# Altium footprint library Footprints.PcbLib: 320 footprints (part 4 of 20)
Each footprint in its own frame and in the unit in brackets; x right, y up, seen from the top. Pads: shape width x height; smd on the part's side, far side on the other; paste and mask are expansions set on the pad; w line width, h text height; cw(c..) or ccw(c..) is an arc to the next point about the centre after c.
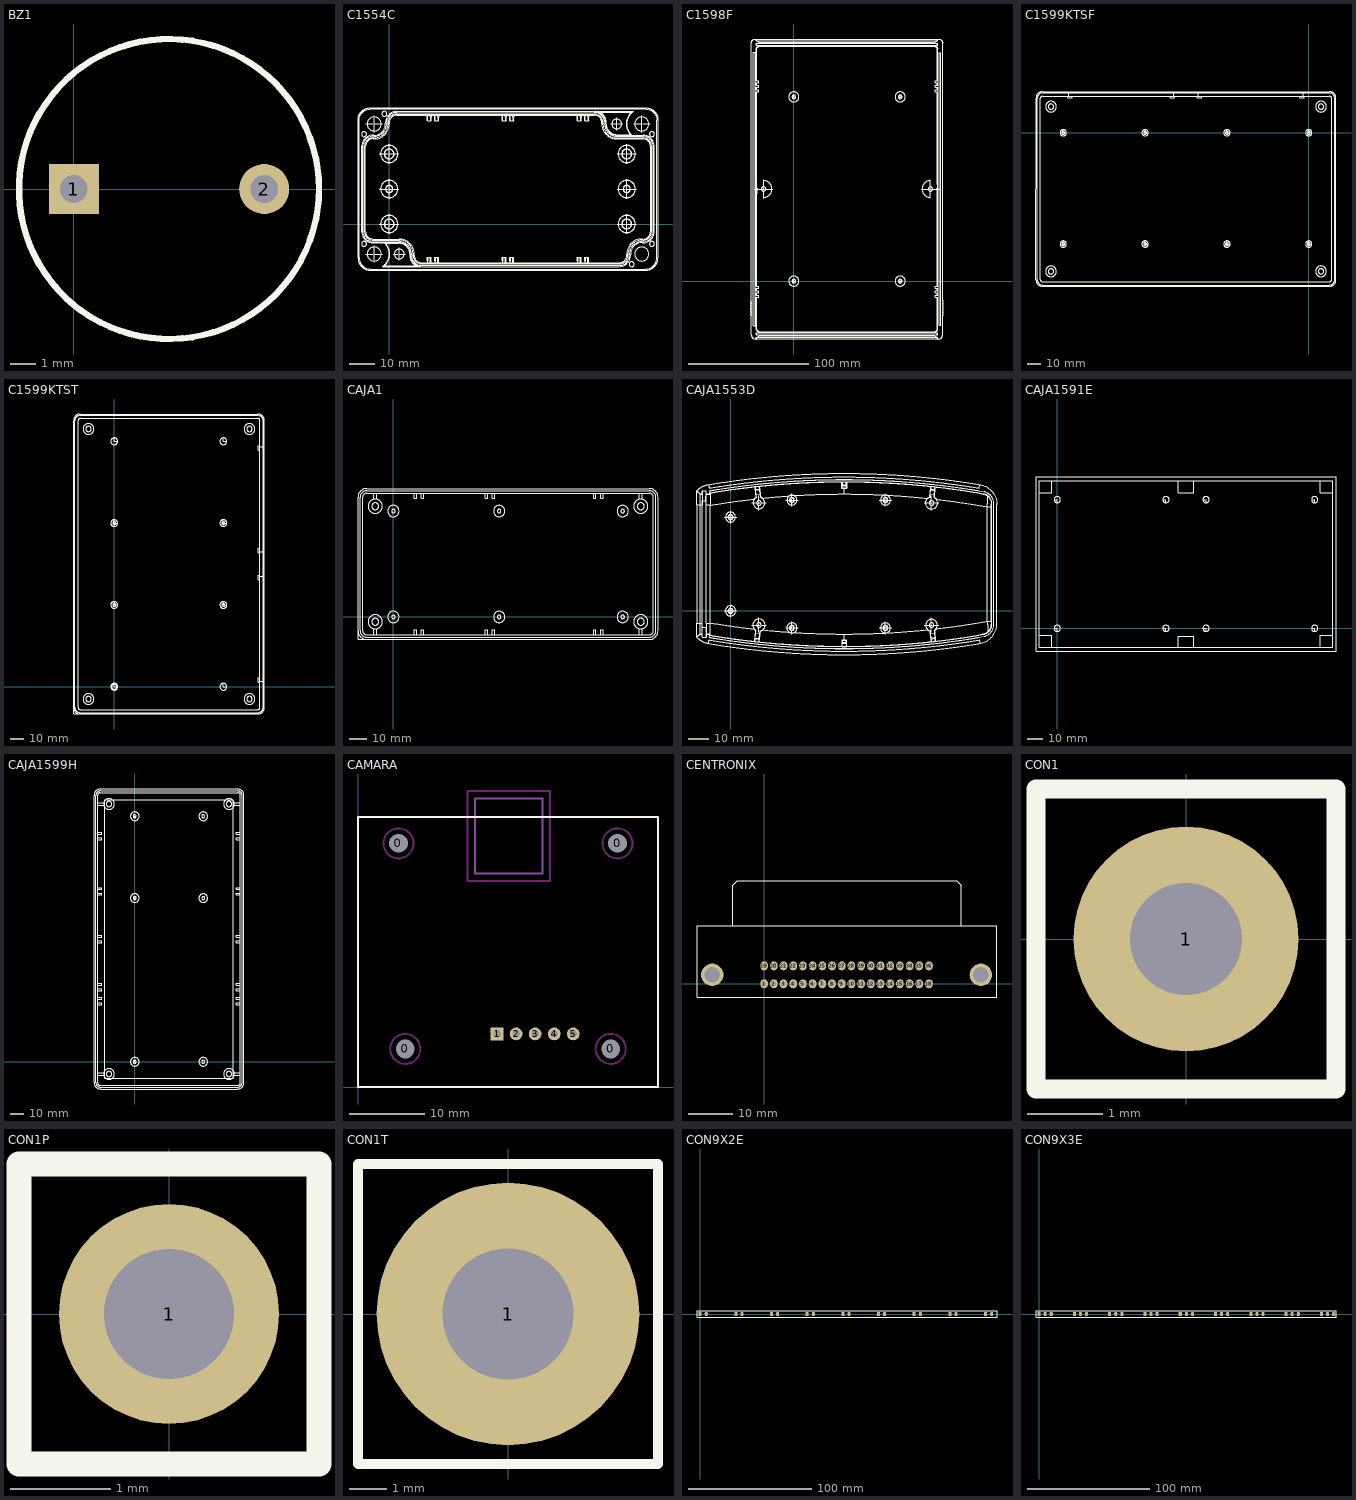
[diagram p3: the footprints below, top view; thin cyan lines are the x and y axes]

## BZ1 [mm]
pads (2):
  rect 2x2 hole 1.1: 1(0,0)
  round 2 hole 1.1: 2(7.62,0)
Top Overlay:
  circle w0.254: c3.81,0 r6

## C1554C [mm]
Top Overlay:
  drawing of 6162 lines, arcs and shapes, not listed

## C1598F [mm]
Top Overlay:
  drawing of 3070 lines, arcs and shapes, not listed

## C1599KTSF [mm]
Top Overlay:
  circle w0.2: c-189,19.16 r1.968
  circle w0.2: c-189,19.16 r3.962
  circle w0.2: c9,19.16 r3.962
  circle w0.2: c9,19.16 r1.968
  circle w0.2: c9,-101.632 r3.962
  circle w0.2: c9,-101.632 r1.968
  circle w0.2: c-189,-101.632 r3.962
  circle w0.2: c-189,-101.632 r1.968
  circle w0.2: c-180,0 r1.079
  circle w0.2: c-180,0 r2.362
  circle w0.2: c-120,0 r2.362
  circle w0.2: c-120,0 r1.079
  circle w0.2: c-60,0 r2.362
  circle w0.2: c-60,0 r1.079
  circle w0.2: c0,0 r2.362
  circle w0.2: c0,0 r1.079
  circle w0.2: c0,-81.64 r2.362
  circle w0.2: c0,-81.64 r1.079
  circle w0.2: c-60,-81.64 r2.362
  circle w0.2: c-60,-81.64 r1.079
  circle w0.2: c-120,-81.64 r2.362
  circle w0.2: c-120,-81.64 r1.079
  circle w0.2: c-180,-81.64 r2.362
  circle w0.2: c-180,-81.64 r1.079
  lines w0.2: -200,25.36 cw(c-195.199,25.368) -195.199,30.169 15.199,30.169 cw(c15.199,25.368) 20,25.368 20,-107.839 cw(c15.199,-107.839) 15.199,-112.64 -195.199,-112.64 cw(c-195.199,-107.839) -200,-107.839 -200,25.36 ; -180,-79.278 -180,-81.64 -177.637,-81.64 ; -180,2.362 -180,0 -177.637,0 ; -176.699,26.895 -176.699,25.594 -173.499,25.594 -173.499,26.895 ; -176.098,26.895 -176.098,29.168 ; -175.064,29.168 -175.064,30.169 ; -174.658,29.168 -174.658,30.169 ; -120,-79.278 -120,-81.64 -117.638,-81.64 ; -120,2.362 -120,0 -117.638,0 ; -101.599,26.895 -101.599,25.594 -98.398,25.594 -98.398,26.895 ; -100.439,29.168 -100.439,30.169 ; -100.033,29.168 -100.033,30.169 ; -98.999,26.895 -98.999,29.168 ; -81.601,26.895 -81.601,25.594 -78.401,25.594 -78.401,26.895 ; -81.001,26.895 -81.001,29.168 ; -79.967,29.168 -79.967,30.169 ; -79.561,29.168 -79.561,30.169 ; -60,-79.278 -60,-81.64 -57.638,-81.64 ; -60,2.362 -60,0 -57.638,0 ; -6.501,26.895 -6.501,25.594 -3.301,25.594 -3.301,26.895 ; -5.342,29.168 -5.342,30.169 ; -4.935,29.168 -4.935,30.169 ; -3.901,26.895 -3.901,29.168 ; 0,-79.278 0,-81.64 2.362,-81.64 ; 0,2.362 0,0 2.362,0 ; -198.999,-107.839 ccw(c-195.199,-107.839) -195.199,-111.639 15.199,-111.639 ccw(c15.199,-107.839) 18.999,-107.839 18.999,25.368 ccw(c15.199,25.368) 15.199,29.168 -195.199,29.168 ccw(c-195.199,25.368) -198.999,25.368 -198.999,-107.839 ; -196.726,-107.839 ccw(c-195.199,-107.839) -195.199,-109.366 15.199,-109.366 ccw(c15.199,-107.839) 16.726,-107.839 16.726,25.368 ccw(c15.199,25.368) 15.199,26.895 -195.199,26.895 ccw(c-195.199,25.368) -196.726,25.368 -196.726,-107.839

## C1599KTST [mm]
Top Overlay:
  circle w0.254: c80,60 r2.5
  circle w0.2: c80,60 r1.079
  circle w0.254: c80,120 r2.5
  circle w0.2: c80,120 r1.079
  circle w0.254: c0,60 r2.5
  circle w0.2: c0,60 r1.079
  circle w0.254: c0,0 r2.5
  circle w0.254: c80,0 r2.5
  circle w0.254: c80,180 r2.5
  circle w0.254: c0,180 r2.5
  circle w0.254: c0,120 r2.5
  circle w0.254: c0,0 r1.917
  circle w0.2: c0,120 r1.079
  circle w0.2: c-18.823,-9 r1.968
  circle w0.2: c-18.823,-9 r3.962
  circle w0.2: c99.16,-9 r1.968
  circle w0.2: c99.16,-9 r3.962
  circle w0.2: c-18.823,189 r3.962
  circle w0.2: c99.16,189 r3.962
  circle w0.2: c99.16,189 r1.968
  circle w0.2: c-18.823,189 r1.968
  lines w0.1: -29.831,-20 -24.271,-20 ; -29.831,-19.999 -29.831,-13.13
  lines w0.127: -29.831,-15.199 -29.831,195.199 ; -28.83,-15.199 -28.83,195.199 ; -26.557,-15.199 -26.557,195.199 ; -25.03,-20 105.368,-20 ; -25.03,-18.999 105.368,-18.999 ; -25.03,-16.726 105.368,-16.726 ; -25.03,196.726 105.368,196.726 ; -25.03,198.999 105.368,198.999 ; -25.03,200 105.368,200 ; 106.895,-15.199 106.895,195.199 ; 106.895,3.301 105.594,3.301 105.594,6.501 106.895,6.501 ; 106.895,3.902 109.168,3.902 ; 106.895,78.401 105.594,78.401 105.594,81.602 106.895,81.602 ; 106.895,81.001 109.168,81.001 ; 106.895,98.399 105.594,98.399 105.594,101.599 106.895,101.599 ; 106.895,98.999 109.168,98.999 ; 106.895,173.499 105.594,173.499 105.594,176.699 106.895,176.699 ; 106.895,176.098 109.168,176.098 ; 109.168,-15.199 109.168,195.199 ; 109.168,4.935 110.169,4.935 ; 109.168,5.342 110.169,5.342 ; 109.168,79.561 110.169,79.561 ; 109.168,79.967 110.169,79.967 ; 109.168,100.033 110.169,100.033 ; 109.168,100.439 110.169,100.439 ; 109.168,174.658 110.169,174.658 ; 109.168,175.065 110.169,175.065 ; 110.169,-15.199 110.169,195.199
  lines w0.2: -29.831,-15.199 ccw(c-25.03,-15.199) -25.03,-20 ; -29.831,195.199 cw(c-25.03,195.199) -25.03,200 ; -28.83,-15.199 ccw(c-25.03,-15.199) -25.03,-18.999 ; -28.83,195.199 cw(c-25.03,195.199) -25.03,198.999 ; -26.557,-15.199 ccw(c-25.03,-15.199) -25.03,-16.726 ; -26.557,195.199 cw(c-25.03,195.199) -25.03,196.726 ; 105.368,-20 ccw(c105.368,-15.199) 110.169,-15.199 ; 105.368,-18.999 ccw(c105.368,-15.199) 109.168,-15.199 ; 105.368,-16.726 ccw(c105.368,-15.199) 106.895,-15.199 ; 105.368,196.726 cw(c105.368,195.199) 106.895,195.199 ; 105.368,198.999 cw(c105.368,195.199) 109.168,195.199 ; 105.368,200 cw(c105.368,195.199) 110.169,195.199
  lines w0.254: -29.831,-17.999 -29.831,-19.999 -27.841,-19.999 ; 0,1.89 0,0 1.92,0 ; 0,62.36 0,60 2.42,60 ; 0,122.38 0,120 2.48,120 ; 0,182.46 0,180 2.46,180 ; 80,2.47 80,0 82.41,0 ; 80,62.4 80,60 82.43,60 ; 80,122.45 80,120 82.44,120 ; 80,182.39 80,180 82.32,180

## CAJA1 [mm]
Top Overlay:
  circle w0.127: c140.194,62.753 r1.968
  circle w0.127: c140.194,-2.753 r1.968
  circle w0.127: c-10.301,62.753 r1.968
  circle w0.127: c-10.301,-2.753 r1.968
  circle w0.127: c140.194,62.753 r4
  circle w0.127: c-10.301,62.753 r4
  circle w0.127: c-10.301,-2.753 r4
  circle w0.127: c140.194,-2.753 r4
  circle w0.127: c0,60 r3.2
  circle w0.127: c0,60 r1.029
  circle w0.127: c0,0 r1
  circle w0.127: c129.944,0 r1.029
  circle w0.127: c59.944,60 r1.029
  circle w0.127: c59.944,0 r1.029
  circle w0.127: c129.944,60 r3.2
  circle w0.127: c129.944,0 r3.2
  circle w0.127: c59.944,60 r3.2
  circle w0.127: c59.944,0 r3.2
  circle w0.127: c129.944,60 r1.029
  circle w0.127: c0,0 r3.2
  lines w0.127: -18.781,-7.953 -18.781,67.953 ; -18.781,-7.948 ccw(c-15.229,-7.948) -15.229,-11.5 145.121,-11.5 ccw(c145.121,-7.948) 148.674,-7.948 148.674,67.948 ccw(c145.121,67.948) 145.121,71.5 -15.229,71.5 ccw(c-15.229,67.948) -18.781,67.948 ; -11.063,-10.081 -11.063,-6.681 ; -11.063,66.68 -11.063,70.081 ; -9.539,-10.081 -9.539,-6.681 ; -9.539,66.68 -9.539,70.081 ; 11.707,-10.081 11.707,-7.186 13.107,-7.186 13.107,-10.081 ; 11.707,70.081 11.707,67.186 13.107,67.186 13.107,70.081 ; 15.707,-10.081 15.707,-7.186 17.107,-7.186 ; 15.707,70.081 15.707,67.186 17.107,67.186 ; 52.007,-10.081 52.007,-7.186 53.407,-7.186 53.407,-10.081 ; 52.007,70.081 52.007,67.186 53.407,67.186 53.407,70.081 ; 56.007,-10.081 56.007,-7.186 57.407,-7.186 ; 56.007,70.081 56.007,67.186 57.407,67.186 ; 113.407,-10.081 113.407,-7.186 114.807,-7.186 114.807,-10.081 ; 113.407,70.081 113.407,67.186 114.807,67.186 114.807,70.081 ; 117.407,-10.081 117.407,-7.186 118.807,-7.186 118.807,-10.081 ; 117.407,70.081 117.407,67.186 118.807,67.186 118.807,70.081 ; 139.432,-10.081 139.432,-6.681 ; 139.432,66.68 139.432,70.081 ; 140.956,-10.081 140.956,-6.681 ; 140.956,66.68 140.956,70.081 ; -20.055,-7.948 ccw(c-15.229,-7.948) -15.229,-12.774 ; -20.055,-7.948 -20.055,67.948 cw(c-15.229,67.948) -15.229,72.774 145.121,72.774 cw(c145.121,67.948) 149.947,67.948 149.947,-7.948 cw(c145.121,-7.948) 145.121,-12.774 -15.229,-12.774 ; -20.055,-7.948 -20.055,-12.774 -15.229,-12.774 ; 17.107,-7.186 17.107,-10.081 17.107,-7.186 ; 17.107,67.186 17.107,70.081 17.107,67.186 ; 57.407,-7.186 57.407,-10.081 57.407,-7.186 ; 57.407,67.186 57.407,70.081 57.407,67.186 ; -17.362,-7.948 ccw(c-15.229,-7.948) -15.229,-10.081 145.121,-10.081 ccw(c145.121,-7.948) 147.255,-7.948 147.255,67.948 ccw(c145.121,67.948) 145.121,70.081 -15.229,70.081 ccw(c-15.229,67.948) -17.362,67.948 -17.362,-7.948

## CAJA1553D [mm]
Top Overlay:
  drawing of 7706 lines, arcs and shapes, not listed

## CAJA1591E [mm]
Top Overlay:
  circle w0.254: c163,81.5 r2
  circle w0.254: c94.2,81.5 r2
  circle w0.254: c68.8,81.5 r2
  circle w0.254: c0,81.5 r2
  circle w0.254: c163,0 r2
  circle w0.254: c94.2,0 r2
  circle w0.254: c68.8,0 r2
  circle w0.254: c0,0 r2
  lines w0.254: -11.5,-4.5 -3.5,-4.5 -3.5,-12 ; -11.5,86 -3.5,86 -3.5,93.5 ; -2,0 0,0 0,-2 ; -2,81.5 0,81.5 0,79.5 ; 66.8,0 68.8,0 68.8,-2 ; 66.8,81.5 68.8,81.5 68.8,79.5 ; 76.5,-12 76.5,-5 86.5,-5 86.5,-12 ; 76.5,93.5 76.5,86 86.5,86 86.5,93.5 ; 92.2,0 94.2,0 94.2,-2 ; 92.2,81.5 94.2,81.5 94.2,79.5 ; 161,0 163,0 163,-2 ; 161,81.5 163,81.5 163,79.5 ; 166.5,-12 166.5,-4.5 174.5,-4.5 ; 166.5,93.5 166.5,86 174.5,86 ; -13.5,-14.5 -13.5,96 176.5,96 176.5,-14.5 -13.5,-14.5 ; -11.5,-12 -11.5,93.5 174.5,93.5 174.5,-12 -11.5,-12

## CAJA1599H [mm]
Top Overlay:
  circle w0.2: c50.216,0 r3.175
  circle w0.2: c69.101,188.999 r3.95
  circle w0.2: c-18.885,188.999 r3.95
  circle w0.2: c-18.885,-8.994 r3.95
  circle w0.2: c69.101,-8.994 r3.95
  circle w0.2: c50.216,179.984 r3.175
  circle w0.2: c0,179.984 r3.175
  circle w0.2: c50.216,119.99 r3.175
  circle w0.2: c0,119.99 r3.175
  circle w0.2: c0,0 r3.175
  circle w0.2: c50.216,179.984 r1.118
  circle w0.2: c0,179.984 r1.118
  circle w0.2: c50.216,119.99 r1.118
  circle w0.2: c0,119.99 r1.118
  circle w0.2: c50.216,0 r1.118
  circle w0.2: c0,0 r1.118
  circle w0.2: c69.101,188.999 r1.968
  circle w0.2: c-18.885,188.999 r1.968
  circle w0.2: c69.101,-8.994 r1.968
  circle w0.2: c-18.885,-8.994 r1.968
  lines w0.2: -27.165,-9.756 -22.76,-9.756 ; -27.165,-8.232 -22.76,-8.232 ; -27.165,43.231 -24.27,43.231 -24.27,41.831 ; -27.165,45.831 -24.27,45.831 -24.27,47.231 -27.165,47.231 ; -27.165,53.635 -24.27,53.635 -24.27,52.235 ; -27.165,56.235 -24.27,56.235 -24.27,57.635 -27.165,57.635 ; -27.165,88.702 -24.27,88.702 -24.27,87.302 ; -27.165,91.302 -24.27,91.302 -24.27,92.702 -27.165,92.702 ; -27.165,123.719 -24.27,123.719 -24.27,122.319 ; -27.165,126.319 -24.27,126.319 -24.27,127.719 -27.165,127.719 ; -27.165,164.095 -24.27,164.095 -24.27,162.695 ; -27.165,166.695 -24.27,166.695 -24.27,168.095 -27.165,168.095 ; -27.165,188.237 -22.76,188.237 ; -27.165,189.761 -22.76,189.761 ; 72.976,-9.756 77.381,-9.756 ; 72.976,-8.232 77.381,-8.232 ; 72.976,188.237 77.381,188.237 ; 72.976,189.761 77.381,189.761 ; 77.381,41.831 74.486,41.831 74.486,43.231 77.381,43.231 ; 77.381,45.831 74.486,45.831 74.486,47.231 ; 77.381,52.235 74.486,52.235 74.486,53.635 77.381,53.635 ; 77.381,56.235 74.486,56.235 74.486,57.635 ; 77.381,87.302 74.486,87.302 74.486,88.702 77.381,88.702 ; 77.381,91.302 74.486,91.302 74.486,92.702 ; 77.381,122.319 74.486,122.319 74.486,123.719 77.381,123.719 ; 77.381,126.319 74.486,126.319 74.486,127.719 ; 77.381,162.695 74.486,162.695 74.486,164.095 77.381,164.095 ; 77.381,166.695 74.486,166.695 74.486,168.095 ; -24.27,41.831 -27.165,41.831 -24.27,41.831 ; -24.27,52.235 -27.165,52.235 -24.27,52.235 ; -24.27,87.302 -27.165,87.302 -24.27,87.302 ; -24.27,122.319 -27.165,122.319 -24.27,122.319 ; -24.27,162.695 -27.165,162.695 -24.27,162.695 ; 74.486,47.231 77.381,47.231 74.486,47.231 ; 74.486,57.635 77.381,57.635 74.486,57.635 ; 74.486,92.702 77.381,92.702 74.486,92.702 ; 74.486,127.719 77.381,127.719 74.486,127.719 ; 74.486,168.095 77.381,168.095 74.486,168.095 ; -29.883,-15.204 ccw(c-25.108,-15.204) -25.108,-19.98 75.324,-19.98 ccw(c75.324,-15.204) 80.099,-15.204 80.099,195.209 ccw(c75.324,195.209) 75.324,199.984 -25.108,199.984 ccw(c-25.108,195.209) -29.883,195.209 -29.883,-15.204 ; -28.537,-15.204 ccw(c-25.108,-15.204) -25.108,-18.633 75.324,-18.633 ccw(c75.324,-15.204) 78.753,-15.204 78.753,195.209 ccw(c75.324,195.209) 75.324,198.638 -25.108,198.638 ccw(c-25.108,195.209) -28.537,195.209 -28.537,-15.204 ; -27.165,-15.512 ccw(c-25.364,-15.512) -25.364,-17.313 75.58,-17.313 ccw(c75.58,-15.512) 77.381,-15.512 77.381,195.516 ccw(c75.58,195.516) 75.58,197.317 -25.364,197.317 ccw(c-25.364,195.516) -27.165,195.516 -27.165,-15.512 ; -22.174,-12.233 72.39,-12.233 72.39,192.237 -22.174,192.237 -22.174,-12.233
  lines w0.254: 0,1.1 0,0 1.118,0 ; 0,121.1 0,120 0.01,119.99 1.118,119.99 ; 0,178.9 0,179.984 ; 0,180 1.2,180

## CAMARA [mm]
pads (9):
  round 2 hole 2.5: 0(5.4,32.5) 0(6.3,5.1) 0(33.7,5.1) 0(34.6,32.5)
  rect 1.7x1.7 hole 1: 1(18.54,7.1)
  round 1.7 hole 1: 2(21.08,7.1) 3(23.62,7.1) 4(26.16,7.1) 5(28.7,7.1)
Top Overlay:
  lines w0.254: 0,0 40,0 40,36 0,36 0,0
Keep-Out Layer:
  circle w0.254: c6.3,5.1 r2
  circle w0.254: c33.7,5.1 r2
  circle w0.254: c34.6,32.5 r2
  circle w0.254: c5.4,32.5 r2
  lines w0.254: 14.6,27.5 14.6,28.5 14.6,39.5 25.6,39.5 25.6,27.5 14.6,27.5
Mechanical 1:
  lines w0.254: 15.6,28.5 24.6,28.5 24.6,38.5 15.6,38.5 15.6,28.5

## CENTRONIX [mm]
pads (38):
  oval 1.7x2 hole 1: 1(0,0) 2(2.165,0) 3(4.33,0) 4(6.495,0) 5(8.66,0) 6(10.825,0) 7(12.99,0) 8(15.155,0) 9(17.32,0) 10(19.485,0) 11(21.65,0) 12(23.815,0) 13(25.98,0) 14(28.145,0) 15(30.31,0) 16(32.475,0) 17(34.64,0) 18(36.805,0) 19(0,4) 20(2.165,4) 21(4.33,4) 22(6.495,4) 23(8.66,4) 24(10.825,4) 25(12.99,4) 26(15.155,4) 27(17.32,4) 28(19.485,4) 29(21.65,4) 30(23.815,4) 31(25.98,4) 32(28.145,4) 33(30.31,4) 34(32.475,4) 35(34.64,4) 36(36.805,4)
  round 5 hole 3.5: ""(-11.6,2) ""(48.4,2)
Top Overlay:
  lines w0.254: -7,13 -7,22 -6,23 43,23 44,22 44,13 ; -15,-3 -15,13 52,13 52,-2 52,-3 -15,-3

## CON1 [mm]
pads (1):
  round 3 hole 1.5: 1(0,0)
Top Overlay:
  lines w0.254: -2,-0.03 -2,2 2,2 2,-2 -2,-2 -2,0

## CON1P [mm]
pads (1):
  round 2.2 hole 1.3: 1(0,0)
Top Overlay:
  lines w0.254: -1.5,-1.5 -1.5,1.5 1.5,1.5 1.5,-1.5 0,-1.5 -1.5,-1.5

## CON1T [mm]
pads (1):
  round 7 hole 3.5: 1(0,0)
Top Overlay:
  lines w0.254: -4,-4 4,-4 4,4 -4,4 -4,-4

## CON9X2E [mm]
pads (18):
  rect 2.5x3.5 hole 1.2: 1(0,0) 3(29,0) 5(58,0) 7(87,0) 9(116,0) 11(145,0) 13(174,0) 15(203,0) 17(232,0)
  oval 2.5x3.5 hole 1.2: 2(5,0) 4(34,0) 6(63,0) 8(92,0) 10(121,0) 12(150,0) 14(179,0) 16(208,0) 18(237,0)
Top Overlay:
  lines w0.254: -2.54,-2.54 -2.54,-2.032 -2.54,2.54 241.3,2.54 241.3,-2.54 -2.54,-2.54

## CON9X3E [mm]
pads (27):
  rect 2.5x3.5 hole 1.2: 1(0,0) 4(29,0) 7(58,0) 10(87,0) 13(116,0) 16(145,0) 19(174,0) 22(203,0) 25(232,0)
  oval 2.5x3.5 hole 1.2: 2(5,0) 3(10,0) 5(34,0) 6(39,0) 8(63,0) 9(68,0) 11(92,0) 12(97,0) 14(121,0) 15(126,0) 17(150,0) 18(155,0) 20(179,0) 21(184,0) 23(208,0) 24(213,0) 26(237,0) 27(242,0)
Top Overlay:
  lines w0.254: -2.54,-2.54 -2.54,-2.032 -2.54,2.54 244,2.54 244,-2.54 -2.54,-2.54